# Altium footprint library IC.PcbLib: 204 footprints (part 10 of 13)
Each footprint in its own frame and in the unit in brackets; x right, y up, seen from the top. Pads: shape width x height; smd on the part's side, far side on the other; paste and mask are expansions set on the pad; w line width, h text height; cw(c..) or ccw(c..) is an arc to the next point about the centre after c.
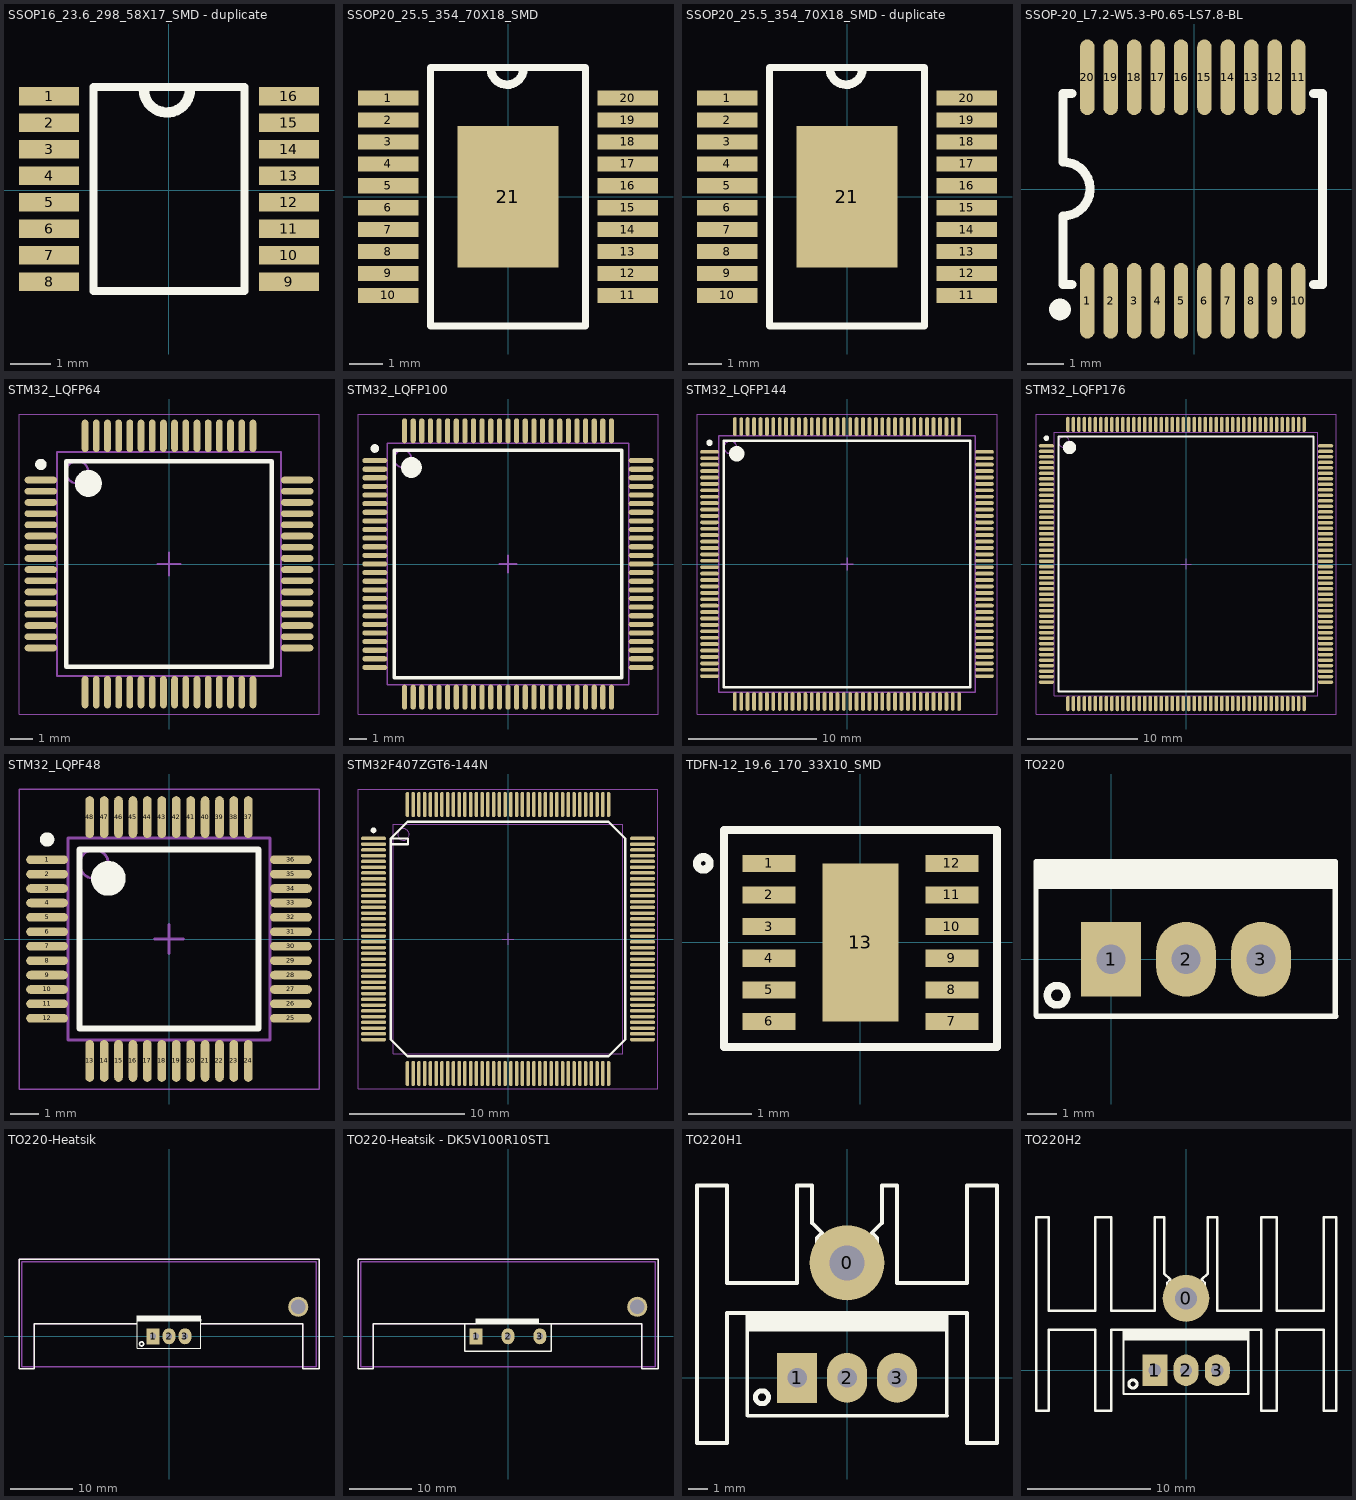
[diagram p9: the footprints below, top view; thin cyan lines are the x and y axes]

## SSOP16_23.6_298_58X17_SMD - duplicate [mm] "CASE: SSOP"
height 2.65
pads (16):
  rect 1.475x0.45 smd: 1(-2.938,2.3) 2(-2.938,1.65) 3(-2.938,1) 4(-2.938,0.35) 5(-2.938,-0.3) 6(-2.938,-0.95) 7(-2.938,-1.6) 8(-2.938,-2.25) 9(2.938,-2.25) 10(2.938,-1.6) 11(2.938,-0.95) 12(2.938,-0.3) 13(2.938,0.35) 14(2.938,1) 15(2.938,1.65) 16(2.938,2.3)
Top Overlay:
  lines w0.2: -1.85,-2.475 -1.85,2.525 1.85,2.525 1.85,-2.475 -1.85,-2.475
  lines w0.254: -0.615,2.464 ccw(c-0.051,2.464) 0.513,2.483
3D body "NPIC6C596APWJ.stp": height 1.1, standoff 0, extent -3.2,-2.474 3.2,2.526

## SSOP20_25.5_354_70X18_SMD [mm] "CASE: SSOP"
height 1.1
pads (21):
  rect 1.8x0.45 smd mask+0.076: 1(-3.55,2.925) 2(-3.55,2.275) 3(-3.55,1.625) 4(-3.55,0.975) 5(-3.55,0.325) 6(-3.55,-0.325) 7(-3.55,-0.975) 8(-3.55,-1.625) 9(-3.55,-2.275) 10(-3.55,-2.925) 11(3.55,-2.925) 12(3.55,-2.275) 13(3.55,-1.625) 14(3.55,-0.975) 15(3.55,-0.325) 16(3.55,0.325) 17(3.55,0.975) 18(3.55,1.625) 19(3.55,2.275) 20(3.55,2.925)
  rect 3x4.2 smd: 21(0,0)
Top Overlay:
  lines w0.2: -2.3,-3.835 -2.3,3.835 2.3,3.835 2.3,-3.835 -2.3,-3.835
  lines w0.254: -0.51,3.783 ccw(c-0.025,3.81) 0.458,3.768
3D body "MTCH108-I_SS.stp": height 2, standoff 0, extent -3.9,-3.6 3.9,3.6

## SSOP20_25.5_354_70X18_SMD - duplicate [mm] "CASE: SSOP"
height 1.1
pads (21):
  rect 1.8x0.45 smd mask+0.076: 1(-3.55,2.925) 2(-3.55,2.275) 3(-3.55,1.625) 4(-3.55,0.975) 5(-3.55,0.325) 6(-3.55,-0.325) 7(-3.55,-0.975) 8(-3.55,-1.625) 9(-3.55,-2.275) 10(-3.55,-2.925) 11(3.55,-2.925) 12(3.55,-2.275) 13(3.55,-1.625) 14(3.55,-0.975) 15(3.55,-0.325) 16(3.55,0.325) 17(3.55,0.975) 18(3.55,1.625) 19(3.55,2.275) 20(3.55,2.925)
  rect 3x4.2 smd: 21(0,0)
Top Overlay:
  lines w0.2: -2.3,-3.835 -2.3,3.835 2.3,3.835 2.3,-3.835 -2.3,-3.835
  lines w0.254: -0.51,3.783 ccw(c-0.025,3.81) 0.458,3.768
3D body "MTCH108-I_SS.stp": height 2, standoff 0, extent -3.9,-3.6 3.9,3.6

## SSOP-20_L7.2-W5.3-P0.65-LS7.8-BL [mm]
pads (20):
  oval 0.4x2.1 smd: 1(-2.973,-3.1) 2(-2.322,-3.1) 3(-1.672,-3.1) 4(-1.022,-3.1) 5(-0.372,-3.1) 6(0.279,-3.1) 7(0.929,-3.1) 8(1.579,-3.1) 9(2.229,-3.1) 10(2.879,-3.1) 11(2.879,3.1) 12(2.229,3.1) 13(1.579,3.1) 14(0.929,3.1) 15(0.279,3.1) 16(-0.372,3.1) 17(-1.022,3.1) 18(-1.672,3.1) 19(-2.322,3.1) 20(-2.973,3.1)
Top Overlay:
  lines w0.254: -3.647,-0.75 -3.647,-2.65 -3.404,-2.65 ; -3.646,-0.749 ccw(c-3.646,0) -3.647,0.75 -3.647,2.65 -3.404,2.65 ; 3.311,-2.65 3.553,-2.65 3.553,2.65 3.311,2.65
  lines w0.3: -3.841,-3.444 cw(c-3.73,-3.343) -3.831,-3.454
3D body "SSOP20L-150-0.64.STEP": height 1.63, standoff 0, extent -3.725,-2.997 3.725,2.997

## STM32_LQFP64 [mm] "TSQFP, 64-Leads, Body 10.00x10.00mm, Pitch 0.50mm, IPC Medium Density"
height 1.6
pads (64):
  oval 1.45x0.3 smd: 1(-5.725,3.75) 2(-5.725,3.25) 3(-5.725,2.75) 4(-5.725,2.25) 5(-5.725,1.75) 6(-5.725,1.25) 7(-5.725,0.75) 8(-5.725,0.25) 9(-5.725,-0.25) 10(-5.725,-0.75) 11(-5.725,-1.25) 12(-5.725,-1.75) 13(-5.725,-2.25) 14(-5.725,-2.75) 15(-5.725,-3.25) 16(-5.725,-3.75) 33(5.725,-3.75) 34(5.725,-3.25) 35(5.725,-2.75) 36(5.725,-2.25) 37(5.725,-1.75) 38(5.725,-1.25) 39(5.725,-0.75) 40(5.725,-0.25) 41(5.725,0.25) 42(5.725,0.75) 43(5.725,1.25) 44(5.725,1.75) 45(5.725,2.25) 46(5.725,2.75) 47(5.725,3.25) 48(5.725,3.75)
  oval 0.3x1.45 smd: 17(-3.75,-5.725) 18(-3.25,-5.725) 19(-2.75,-5.725) 20(-2.25,-5.725) 21(-1.75,-5.725) 22(-1.25,-5.725) 23(-0.75,-5.725) 24(-0.25,-5.725) 25(0.25,-5.725) 26(0.75,-5.725) 27(1.25,-5.725) 28(1.75,-5.725) 29(2.25,-5.725) 30(2.75,-5.725) 31(3.25,-5.725) 32(3.75,-5.725) 49(3.75,5.725) 50(3.25,5.725) 51(2.75,5.725) 52(2.25,5.725) 53(1.75,5.725) 54(1.25,5.725) 55(0.75,5.725) 56(0.25,5.725) 57(-0.25,5.725) 58(-0.75,5.725) 59(-1.25,5.725) 60(-1.75,5.725) 61(-2.25,5.725) 62(-2.75,5.725) 63(-3.25,5.725) 64(-3.75,5.725)
Top Overlay:
  circle w0.6: c-3.6,3.6 r0.3
  circle w0.25: c-5.725,4.45 r0.125
  lines w0.2: -4.6,-4.6 4.6,-4.6 4.6,4.6 -4.6,4.6 -4.6,-4.6
Mechanical 13:
  circle w0.1: c-4.1,4.1 r0.5
  lines w0.1: -5,-5 5,-5 5,5 -5,5 -5,-5
Mechanical 15:
  lines w0.05: -6.7,-6.7 6.7,-6.7 6.7,6.7 -6.7,6.7 -6.7,-6.7
  lines w0.1: -0.5,0 0.5,0 ; 0,-0.5 0,0.5
3D body "LQFP64.step": height 1.6, standoff 0, extent -6,-6 6,6

## STM32_LQFP100 [mm] "TSQFP, 100-Leads, Body 14.00x14.00mm, Pitch 0.50mm, IPC Medium Density"
height 1.6
pads (100):
  oval 1.45x0.3 smd: 1(-7.725,6) 2(-7.725,5.5) 3(-7.725,5) 4(-7.725,4.5) 5(-7.725,4) 6(-7.725,3.5) 7(-7.725,3) 8(-7.725,2.5) 9(-7.725,2) 10(-7.725,1.5) 11(-7.725,1) 12(-7.725,0.5) 13(-7.725,0) 14(-7.725,-0.5) 15(-7.725,-1) 16(-7.725,-1.5) 17(-7.725,-2) 18(-7.725,-2.5) 19(-7.725,-3) 20(-7.725,-3.5) 21(-7.725,-4) 22(-7.725,-4.5) 23(-7.725,-5) 24(-7.725,-5.5) 25(-7.725,-6) 51(7.725,-6) 52(7.725,-5.5) 53(7.725,-5) 54(7.725,-4.5) 55(7.725,-4) 56(7.725,-3.5) 57(7.725,-3) 58(7.725,-2.5) 59(7.725,-2) 60(7.725,-1.5) 61(7.725,-1) 62(7.725,-0.5) 63(7.725,0) 64(7.725,0.5) 65(7.725,1) 66(7.725,1.5) 67(7.725,2) 68(7.725,2.5) 69(7.725,3) 70(7.725,3.5) 71(7.725,4) 72(7.725,4.5) 73(7.725,5) 74(7.725,5.5) 75(7.725,6)
  oval 0.3x1.45 smd: 26(-6,-7.725) 27(-5.5,-7.725) 28(-5,-7.725) 29(-4.5,-7.725) 30(-4,-7.725) 31(-3.5,-7.725) 32(-3,-7.725) 33(-2.5,-7.725) 34(-2,-7.725) 35(-1.5,-7.725) 36(-1,-7.725) 37(-0.5,-7.725) 38(0,-7.725) 39(0.5,-7.725) 40(1,-7.725) 41(1.5,-7.725) 42(2,-7.725) 43(2.5,-7.725) 44(3,-7.725) 45(3.5,-7.725) 46(4,-7.725) 47(4.5,-7.725) 48(5,-7.725) 49(5.5,-7.725) 50(6,-7.725) 76(6,7.725) 77(5.5,7.725) 78(5,7.725) 79(4.5,7.725) 80(4,7.725) 81(3.5,7.725) 82(3,7.725) 83(2.5,7.725) 84(2,7.725) 85(1.5,7.725) 86(1,7.725) 87(0.5,7.725) 88(0,7.725) 89(-0.5,7.725) 90(-1,7.725) 91(-1.5,7.725) 92(-2,7.725) 93(-2.5,7.725) 94(-3,7.725) 95(-3.5,7.725) 96(-4,7.725) 97(-4.5,7.725) 98(-5,7.725) 99(-5.5,7.725) 100(-6,7.725)
Top Overlay:
  circle w0.6: c-5.6,5.6 r0.3
  circle w0.25: c-7.725,6.7 r0.125
  lines w0.2: -6.6,-6.6 6.6,-6.6 6.6,6.6 -6.6,6.6 -6.6,-6.6
Mechanical 13:
  circle w0.1: c-6.1,6.1 r0.5
  lines w0.1: -7,-7 7,-7 7,7 -7,7 -7,-7
Mechanical 15:
  lines w0.05: -8.7,-8.7 8.7,-8.7 8.7,8.7 -8.7,8.7 -8.7,-8.7
  lines w0.1: -0.5,0 0.5,0 ; 0,-0.5 0,0.5
3D body "LQFP100.step": height 1.6, standoff 0, extent -8,-8 8,8

## STM32_LQFP144 [mm] "TSQFP, 144-Leads, Body 20.00x20.00mm, Pitch 0.50mm, IPC Medium Density"
height 1.6
pads (144):
  oval 1.45x0.3 smd: 1(-10.725,8.75) 2(-10.725,8.25) 3(-10.725,7.75) 4(-10.725,7.25) 5(-10.725,6.75) 6(-10.725,6.25) 7(-10.725,5.75) 8(-10.725,5.25) 9(-10.725,4.75) 10(-10.725,4.25) 11(-10.725,3.75) 12(-10.725,3.25) 13(-10.725,2.75) 14(-10.725,2.25) 15(-10.725,1.75) 16(-10.725,1.25) 17(-10.725,0.75) 18(-10.725,0.25) 19(-10.725,-0.25) 20(-10.725,-0.75) 21(-10.725,-1.25) 22(-10.725,-1.75) 23(-10.725,-2.25) 24(-10.725,-2.75) 25(-10.725,-3.25) 26(-10.725,-3.75) 27(-10.725,-4.25) 28(-10.725,-4.75) 29(-10.725,-5.25) 30(-10.725,-5.75) 31(-10.725,-6.25) 32(-10.725,-6.75) 33(-10.725,-7.25) 34(-10.725,-7.75) 35(-10.725,-8.25) 36(-10.725,-8.75) 73(10.725,-8.75) 74(10.725,-8.25) 75(10.725,-7.75) 76(10.725,-7.25) 77(10.725,-6.75) 78(10.725,-6.25) 79(10.725,-5.75) 80(10.725,-5.25) 81(10.725,-4.75) 82(10.725,-4.25) 83(10.725,-3.75) 84(10.725,-3.25) 85(10.725,-2.75) 86(10.725,-2.25) 87(10.725,-1.75) 88(10.725,-1.25) 89(10.725,-0.75) 90(10.725,-0.25) 91(10.725,0.25) 92(10.725,0.75) 93(10.725,1.25) 94(10.725,1.75) 95(10.725,2.25) 96(10.725,2.75) 97(10.725,3.25) 98(10.725,3.75) 99(10.725,4.25) 100(10.725,4.75) 101(10.725,5.25) 102(10.725,5.75) 103(10.725,6.25) 104(10.725,6.75) 105(10.725,7.25) 106(10.725,7.75) 107(10.725,8.25) 108(10.725,8.75)
  oval 0.3x1.45 smd: 37(-8.75,-10.725) 38(-8.25,-10.725) 39(-7.75,-10.725) 40(-7.25,-10.725) 41(-6.75,-10.725) 42(-6.25,-10.725) 43(-5.75,-10.725) 44(-5.25,-10.725) 45(-4.75,-10.725) 46(-4.25,-10.725) 47(-3.75,-10.725) 48(-3.25,-10.725) 49(-2.75,-10.725) 50(-2.25,-10.725) 51(-1.75,-10.725) 52(-1.25,-10.725) 53(-0.75,-10.725) 54(-0.25,-10.725) 55(0.25,-10.725) 56(0.75,-10.725) 57(1.25,-10.725) 58(1.75,-10.725) 59(2.25,-10.725) 60(2.75,-10.725) 61(3.25,-10.725) 62(3.75,-10.725) 63(4.25,-10.725) 64(4.75,-10.725) 65(5.25,-10.725) 66(5.75,-10.725) 67(6.25,-10.725) 68(6.75,-10.725) 69(7.25,-10.725) 70(7.75,-10.725) 71(8.25,-10.725) 72(8.75,-10.725) 109(8.75,10.725) 110(8.25,10.725) 111(7.75,10.725) 112(7.25,10.725) 113(6.75,10.725) 114(6.25,10.725) 115(5.75,10.725) 116(5.25,10.725) 117(4.75,10.725) 118(4.25,10.725) 119(3.75,10.725) 120(3.25,10.725) 121(2.75,10.725) 122(2.25,10.725) 123(1.75,10.725) 124(1.25,10.725) 125(0.75,10.725) 126(0.25,10.725) 127(-0.25,10.725) 128(-0.75,10.725) 129(-1.25,10.725) 130(-1.75,10.725) 131(-2.25,10.725) 132(-2.75,10.725) 133(-3.25,10.725) 134(-3.75,10.725) 135(-4.25,10.725) 136(-4.75,10.725) 137(-5.25,10.725) 138(-5.75,10.725) 139(-6.25,10.725) 140(-6.75,10.725) 141(-7.25,10.725) 142(-7.75,10.725) 143(-8.25,10.725) 144(-8.75,10.725)
Top Overlay:
  circle w0.6: c-8.6,8.6 r0.3
  circle w0.25: c-10.725,9.45 r0.125
  lines w0.2: -9.6,-9.6 9.6,-9.6 9.6,9.6 -9.6,9.6 -9.6,-9.6
Mechanical 13:
  circle w0.1: c-9.1,9.1 r0.5
  lines w0.1: -10,-10 10,-10 10,10 -10,10 -10,-10
Mechanical 15:
  lines w0.05: -11.7,-11.7 11.7,-11.7 11.7,11.7 -11.7,11.7 -11.7,-11.7
  lines w0.1: -0.5,0 0.5,0 ; 0,-0.5 0,0.5
3D body "LQFP144.step": height 1.6, standoff 0, extent -11,-11 11,11

## STM32_LQFP176 [mm] "TSQFP, 176-Leads, Body 24.00x24.00mm, Pitch 0.50mm, IPC Medium Density"
height 1.6
pads (176):
  oval 1.4x0.3 smd: 1(-12.7,10.75) 2(-12.7,10.25) 3(-12.7,9.75) 4(-12.7,9.25) 5(-12.7,8.75) 6(-12.7,8.25) 7(-12.7,7.75) 8(-12.7,7.25) 9(-12.7,6.75) 10(-12.7,6.25) 11(-12.7,5.75) 12(-12.7,5.25) 13(-12.7,4.75) 14(-12.7,4.25) 15(-12.7,3.75) 16(-12.7,3.25) 17(-12.7,2.75) 18(-12.7,2.25) 19(-12.7,1.75) 20(-12.7,1.25) 21(-12.7,0.75) 22(-12.7,0.25) 23(-12.7,-0.25) 24(-12.7,-0.75) 25(-12.7,-1.25) 26(-12.7,-1.75) 27(-12.7,-2.25) 28(-12.7,-2.75) 29(-12.7,-3.25) 30(-12.7,-3.75) 31(-12.7,-4.25) 32(-12.7,-4.75) 33(-12.7,-5.25) 34(-12.7,-5.75) 35(-12.7,-6.25) 36(-12.7,-6.75) 37(-12.7,-7.25) 38(-12.7,-7.75) 39(-12.7,-8.25) 40(-12.7,-8.75) 41(-12.7,-9.25) 42(-12.7,-9.75) 43(-12.7,-10.25) 44(-12.7,-10.75) 89(12.7,-10.75) 90(12.7,-10.25) 91(12.7,-9.75) 92(12.7,-9.25) 93(12.7,-8.75) 94(12.7,-8.25) 95(12.7,-7.75) 96(12.7,-7.25) 97(12.7,-6.75) 98(12.7,-6.25) 99(12.7,-5.75) 100(12.7,-5.25) 101(12.7,-4.75) 102(12.7,-4.25) 103(12.7,-3.75) 104(12.7,-3.25) 105(12.7,-2.75) 106(12.7,-2.25) 107(12.7,-1.75) 108(12.7,-1.25) 109(12.7,-0.75) 110(12.7,-0.25) 111(12.7,0.25) 112(12.7,0.75) 113(12.7,1.25) 114(12.7,1.75) 115(12.7,2.25) 116(12.7,2.75) 117(12.7,3.25) 118(12.7,3.75) 119(12.7,4.25) 120(12.7,4.75) 121(12.7,5.25) 122(12.7,5.75) 123(12.7,6.25) 124(12.7,6.75) 125(12.7,7.25) 126(12.7,7.75) 127(12.7,8.25) 128(12.7,8.75) 129(12.7,9.25) 130(12.7,9.75) 131(12.7,10.25) 132(12.7,10.75)
  oval 0.3x1.4 smd: 45(-10.75,-12.7) 46(-10.25,-12.7) 47(-9.75,-12.7) 48(-9.25,-12.7) 49(-8.75,-12.7) 50(-8.25,-12.7) 51(-7.75,-12.7) 52(-7.25,-12.7) 53(-6.75,-12.7) 54(-6.25,-12.7) 55(-5.75,-12.7) 56(-5.25,-12.7) 57(-4.75,-12.7) 58(-4.25,-12.7) 59(-3.75,-12.7) 60(-3.25,-12.7) 61(-2.75,-12.7) 62(-2.25,-12.7) 63(-1.75,-12.7) 64(-1.25,-12.7) 65(-0.75,-12.7) 66(-0.25,-12.7) 67(0.25,-12.7) 68(0.75,-12.7) 69(1.25,-12.7) 70(1.75,-12.7) 71(2.25,-12.7) 72(2.75,-12.7) 73(3.25,-12.7) 74(3.75,-12.7) 75(4.25,-12.7) 76(4.75,-12.7) 77(5.25,-12.7) 78(5.75,-12.7) 79(6.25,-12.7) 80(6.75,-12.7) 81(7.25,-12.7) 82(7.75,-12.7) 83(8.25,-12.7) 84(8.75,-12.7) 85(9.25,-12.7) 86(9.75,-12.7) 87(10.25,-12.7) 88(10.75,-12.7) 133(10.75,12.7) 134(10.25,12.7) 135(9.75,12.7) 136(9.25,12.7) 137(8.75,12.7) 138(8.25,12.7) 139(7.75,12.7) 140(7.25,12.7) 141(6.75,12.7) 142(6.25,12.7) 143(5.75,12.7) 144(5.25,12.7) 145(4.75,12.7) 146(4.25,12.7) 147(3.75,12.7) 148(3.25,12.7) 149(2.75,12.7) 150(2.25,12.7) 151(1.75,12.7) 152(1.25,12.7) 153(0.75,12.7) 154(0.25,12.7) 155(-0.25,12.7) 156(-0.75,12.7) 157(-1.25,12.7) 158(-1.75,12.7) 159(-2.25,12.7) 160(-2.75,12.7) 161(-3.25,12.7) 162(-3.75,12.7) 163(-4.25,12.7) 164(-4.75,12.7) 165(-5.25,12.7) 166(-5.75,12.7) 167(-6.25,12.7) 168(-6.75,12.7) 169(-7.25,12.7) 170(-7.75,12.7) 171(-8.25,12.7) 172(-8.75,12.7) 173(-9.25,12.7) 174(-9.75,12.7) 175(-10.25,12.7) 176(-10.75,12.7)
Top Overlay:
  circle w0.25: c-12.7,11.45 r0.125
  circle w0.6: c-10.6,10.6 r0.3
  lines w0.2: -11.6,-11.6 -11.6,11.6 11.6,11.6 11.6,-11.6 -11.6,-11.6
Mechanical 13:
  circle w0.1: c-11.1,11.1 r0.5
  lines w0.1: -12,-12 -12,12 12,12 12,-12 -12,-12
Mechanical 15:
  lines w0.05: -13.65,-13.65 -13.65,13.65 13.65,13.65 13.65,-13.65 -13.65,-13.65
  lines w0.1: -0.5,0 0.5,0 ; 0,-0.5 0,0.5
3D body: height 1.6, standoff 0.15, extent -12,-12 12,12

## STM32_LQPF48 [mm]
height 1.6
pads (48):
  oval 1.45x0.3 smd: 1(-4.225,2.75) 2(-4.225,2.25) 3(-4.225,1.75) 4(-4.225,1.25) 5(-4.225,0.75) 6(-4.225,0.25) 7(-4.225,-0.25) 8(-4.225,-0.75) 9(-4.225,-1.25) 10(-4.225,-1.75) 11(-4.225,-2.25) 12(-4.225,-2.75) 25(4.225,-2.75) 26(4.225,-2.25) 27(4.225,-1.75) 28(4.225,-1.25) 29(4.225,-0.75) 30(4.225,-0.25) 31(4.225,0.25) 32(4.225,0.75) 33(4.225,1.25) 34(4.225,1.75) 35(4.225,2.25) 36(4.225,2.75)
  oval 0.3x1.45 smd: 13(-2.75,-4.225) 14(-2.25,-4.225) 15(-1.75,-4.225) 16(-1.25,-4.225) 17(-0.75,-4.225) 18(-0.25,-4.225) 19(0.25,-4.225) 20(0.75,-4.225) 21(1.25,-4.225) 22(1.75,-4.225) 23(2.25,-4.225) 24(2.75,-4.225) 37(2.75,4.225) 38(2.25,4.225) 39(1.75,4.225) 40(1.25,4.225) 41(0.75,4.225) 42(0.25,4.225) 43(-0.25,4.225) 44(-0.75,4.225) 45(-1.25,4.225) 46(-1.75,4.225) 47(-2.25,4.225) 48(-2.75,4.225)
Top Overlay:
  circle w0.6: c-2.1,2.1 r0.3
  circle w0.25: c-4.225,3.45 r0.125
  lines w0.2: -3.1,-3.1 3.1,-3.1 3.1,3.1 -3.1,3.1 -3.1,-3.1
Mechanical 13:
  circle w0.1: c-2.6,2.6 r0.5
  lines w0.1: -3.5,-3.5 3.5,-3.5 3.5,3.5 -3.5,3.5 -3.5,-3.5
Mechanical 15:
  lines w0.05: -5.2,-5.2 5.2,-5.2 5.2,5.2 -5.2,5.2 -5.2,-5.2
  lines w0.1: -0.5,0 0.5,0 ; 0,-0.5 0,0.5
3D body "STM32F103C8T62.step": height 1.6, standoff 0, extent -4.5,-4.5 4.5,4.5

## STM32F407ZGT6-144N [mm] "CQFP, 144-Leads, Body 24,70x24,70mm, Pitch 0,50mm, IPC Medium Density"
height 1.6
pads (144):
  oval 2.2x0.3 smd: 1(-11.7,8.75) 2(-11.7,8.25) 3(-11.7,7.75) 4(-11.7,7.25) 5(-11.7,6.75) 6(-11.7,6.25) 7(-11.7,5.75) 8(-11.7,5.25) 9(-11.7,4.75) 10(-11.7,4.25) 11(-11.7,3.75) 12(-11.7,3.25) 13(-11.7,2.75) 14(-11.7,2.25) 15(-11.7,1.75) 16(-11.7,1.25) 17(-11.7,0.75) 18(-11.7,0.25) 19(-11.7,-0.25) 20(-11.7,-0.75) 21(-11.7,-1.25) 22(-11.7,-1.75) 23(-11.7,-2.25) 24(-11.7,-2.75) 25(-11.7,-3.25) 26(-11.7,-3.75) 27(-11.7,-4.25) 28(-11.7,-4.75) 29(-11.7,-5.25) 30(-11.7,-5.75) 31(-11.7,-6.25) 32(-11.7,-6.75) 33(-11.7,-7.25) 34(-11.7,-7.75) 35(-11.7,-8.25) 36(-11.7,-8.75) 73(11.7,-8.75) 74(11.7,-8.25) 75(11.7,-7.75) 76(11.7,-7.25) 77(11.7,-6.75) 78(11.7,-6.25) 79(11.7,-5.75) 80(11.7,-5.25) 81(11.7,-4.75) 82(11.7,-4.25) 83(11.7,-3.75) 84(11.7,-3.25) 85(11.7,-2.75) 86(11.7,-2.25) 87(11.7,-1.75) 88(11.7,-1.25) 89(11.7,-0.75) 90(11.7,-0.25) 91(11.7,0.25) 92(11.7,0.75) 93(11.7,1.25) 94(11.7,1.75) 95(11.7,2.25) 96(11.7,2.75) 97(11.7,3.25) 98(11.7,3.75) 99(11.7,4.25) 100(11.7,4.75) 101(11.7,5.25) 102(11.7,5.75) 103(11.7,6.25) 104(11.7,6.75) 105(11.7,7.25) 106(11.7,7.75) 107(11.7,8.25) 108(11.7,8.75)
  oval 0.3x2.2 smd: 37(-8.75,-11.7) 38(-8.25,-11.7) 39(-7.75,-11.7) 40(-7.25,-11.7) 41(-6.75,-11.7) 42(-6.25,-11.7) 43(-5.75,-11.7) 44(-5.25,-11.7) 45(-4.75,-11.7) 46(-4.25,-11.7) 47(-3.75,-11.7) 48(-3.25,-11.7) 49(-2.75,-11.7) 50(-2.25,-11.7) 51(-1.75,-11.7) 52(-1.25,-11.7) 53(-0.75,-11.7) 54(-0.25,-11.7) 55(0.25,-11.7) 56(0.75,-11.7) 57(1.25,-11.7) 58(1.75,-11.7) 59(2.25,-11.7) 60(2.75,-11.7) 61(3.25,-11.7) 62(3.75,-11.7) 63(4.25,-11.7) 64(4.75,-11.7) 65(5.25,-11.7) 66(5.75,-11.7) 67(6.25,-11.7) 68(6.75,-11.7) 69(7.25,-11.7) 70(7.75,-11.7) 71(8.25,-11.7) 72(8.75,-11.7) 109(8.75,11.7) 110(8.25,11.7) 111(7.75,11.7) 112(7.25,11.7) 113(6.75,11.7) 114(6.25,11.7) 115(5.75,11.7) 116(5.25,11.7) 117(4.75,11.7) 118(4.25,11.7) 119(3.75,11.7) 120(3.25,11.7) 121(2.75,11.7) 122(2.25,11.7) 123(1.75,11.7) 124(1.25,11.7) 125(0.75,11.7) 126(0.25,11.7) 127(-0.25,11.7) 128(-0.75,11.7) 129(-1.25,11.7) 130(-1.75,11.7) 131(-2.25,11.7) 132(-2.75,11.7) 133(-3.25,11.7) 134(-3.75,11.7) 135(-4.25,11.7) 136(-4.75,11.7) 137(-5.25,11.7) 138(-5.75,11.7) 139(-6.25,11.7) 140(-6.75,11.7) 141(-7.25,11.7) 142(-7.75,11.7) 143(-8.25,11.7) 144(-8.75,11.7)
Top Overlay:
  circle w0.25: c-11.7,9.45 r0.125
  lines w0.2: -10.2,8.25 -8.7,8.25 -8.7,8.75 -10.2,8.75 ; -10.2,8.75 -8.75,10.2 8.75,10.2 10.2,8.75 10.2,-8.75 8.75,-10.2 -8.75,-10.2 -10.2,-8.75 -10.2,8.75
Mechanical 13:
  circle w0.1: c-9.1,9.1 r0.5
  lines w0.1: -10,-10 10,-10 10,10 -10,10 -10,-10
Mechanical 15:
  lines w0.05: -13.05,-13.05 13.05,-13.05 13.05,13.05 -13.05,13.05 -13.05,-13.05
  lines w0.1: -0.5,0 0.5,0 ; 0,-0.5 0,0.5
3D body "STM32F407ZGT6-144N.step": height 1.45, standoff 0, extent -12.45,-12.45 12.45,12.45

## TDFN-12_19.6_170_33X10_SMD [mm] "TDFN-12 Package"
height 0.5
pads (13):
  rect 0.84x0.27 smd mask+0.076: 1(-1.445,1.25) 2(-1.445,0.75) 3(-1.445,0.25) 4(-1.445,-0.25) 5(-1.445,-0.75) 6(-1.445,-1.25) 7(1.445,-1.25) 8(1.445,-0.75) 9(1.445,-0.25) 10(1.445,0.25) 11(1.445,0.75) 12(1.445,1.25)
  rect 1.2x2.5 smd mask+0.076: 13(0,0)
Top Overlay:
  circle w0.127: c-2.485,1.25 r0.1
  lines w0.127: -2.159,-1.651 2.159,-1.651 2.159,1.778 -2.159,1.778 -2.159,-1.27 -2.159,-1.651
Top Paste:
  region: -0.54,0.79 0.54,0.79 0.54,-0.79 -0.54,-0.79
3D body "User Library-TDFN-12-EP-3x3-05.STEP": height 0.75, standoff 0, extent -1.5,-1.5 1.5,1.5

## TO220 [mil] "TO-220"
height 200
pads (3):
  rect 80x100 hole 39: 1(0,0)
  oval 80x100 hole 39: 2(100,0) 3(200,0)
Top Overlay:
  circle w10: c-72.03,-48 r12.97
  rectangle: -99,94 300,130
  lines w7: 298,107 299,93 ; -100,-75 -99,-76 -76,-76 300,-76 299,-75 299,130 -100,130 -100,-75
3D body "User Library-TO-220-1.STEP": height 322.83, standoff -810.24, extent -94.88,-80 294.88,97.17

## TO220-Heatsik [mil] "TO-220"
height 200
pads (4):
  rect 80x100 hole 39: 1(-100,0)
  oval 80x100 hole 39: 2(0,0) 3(100,0)
  round 125.98 hole 90.55: ""(811.02,185.04)
Top Overlay:
  circle w10: c-172.03,-48 r12.97
  rectangle: -199,94 200,130
  lines w7: 198,107 199,93 ; -200,-75 -200,130 199,130 199,-75 200,-76 -176,-76 -199,-76 -200,-75
  lines w7.87: -200.79,78.74 -846.46,78.74 -846.46,43.31 -846.46,-204.72 -940.94,-204.72 -940.94,484.25 940.94,484.25 940.94,-204.72 838.58,-204.72 838.58,78.74 200.79,78.74
Top Assembly:
  lines w7.87: -925.2,-190.24 925.19,-190.24 925.19,467.24 -925.2,467.24 -925.2,-190.24
Mechanical 15:
  lines w7.87: -940.94,-204.72 -940.94,484.25 940.94,484.25 940.94,-204.72 ; -846.46,-204.72 -846.46,43.31 -846.46,78.74 -200.79,78.74 ; 200.79,78.74 838.58,78.74 838.58,-204.72
  text "+" at -20.32,-30.31 h60
3D body "User Library-TO-220-1.STEP": height 322.83, standoff -810.24, extent -194.88,-80 194.88,97.17
3D body "Part2.STEP": height 1653.54, standoff -39.37, extent -925.2,-190.24 925.19,467.24

## TO220-Heatsik - DK5V100R10ST1 [mil] "TO-220"
height 200
pads (4):
  rect 80x100 hole 39: 1(-200,0)
  oval 80x100 hole 39: 2(0,0) 3(200,0)
  round 125.98 hole 90.55: ""(811.02,185.04)
Top Overlay:
  rectangle: -204.91,74.8 194.09,110.8
  lines w7.87: -270.47,78.35 -270.47,-95.28 259.45,-95.28 271.65,-95.28 271.65,79.13 ; -196.85,78.74 -429.13,78.74 -846.46,78.74 -846.46,43.31 -846.46,-204.72 -940.94,-204.72 -940.94,484.25 940.94,484.25 940.94,-204.72 838.58,-204.72 838.58,78.74 175.59,78.74
Top Assembly:
  lines w7.87: -925.2,-190.24 925.19,-190.24 925.19,467.24 -925.2,467.24 -925.2,-190.24
Mechanical 15:
  lines w7.87: -940.94,-204.72 -940.94,484.25 940.94,484.25 940.94,-204.72 ; -846.46,-204.72 -846.46,43.31 -846.46,78.74 -200.79,78.74 ; 200.79,78.74 838.58,78.74 838.58,-204.72
  text "+" at -20.32,-30.31 h60
3D body "Part2.STEP": height 1653.54, standoff -39.37, extent -925.2,-188.98 925.2,468.5
3D body "User Library-TO-220-1.STEP": height 322.83, standoff -810.24, extent -194.88,-80 194.88,97.17

## TO220H1 [mil] "TO-220 - 1-2-3"
height 200
pads (4):
  round 150 hole 70: 0(0,230)
  rect 80x100 hole 39: 1(-100,0)
  oval 80x100 hole 39: 2(0,0) 3(100,0)
Top Overlay:
  circle w10: c-170.03,-39 r12.97
  rectangle: -201,93 198,129
  lines w7: -200,100 198.5,100 199,93 ; -200,-75 -200,130 199,130 199,-75 200,-76 -176,-76 -199,-76 -200,-75
  lines w8: -300,-130 -240,-130 -240,130 240,130 240,-130 300,-130 300,385 240,385 240,190 100,190 100,385 70,385 70,310 50,290 60,280 60,210 40,190 -40,190 -60,210 -60,280 -50,290 -70,310 -70,385 -100,385 -100,190 -240,190 -240,385 -300,385 -300,-130
3D body "User Library-TO-220-1.STEP": height 850.24, standoff -282.83, extent -194.88,-82 194.88,95.17
3D body "User Library-Disipador 34M8491-1.STEP": height 1000, standoff -122.05, extent -246,73.03 250.06,328.97

## TO220H2 [mil] "TO-220 - 1-2-3"
height 200
pads (4):
  round 150 hole 70: 0(0,230)
  rect 80x100 hole 39: 1(-100,0)
  oval 80x100 hole 39: 2(0,0) 3(100,0)
Top Overlay:
  circle w10: c-169.97,-44 r12.97
  rectangle: -201,95 198,131
  lines w7: -200,100 198.5,100 199,93 ; -200,-75 -199,-76 -176,-76 200,-76 199,-75 199,130 -200,130 -200,-75
  lines w8: -480,-130 -480,490 -440,490 -440,190 -290,190 -290,490 -240,490 -240,190 -100,190 -100,490 -70,490 -70,310 -50,290 -60,280 -60,210 -40,190 40,190 60,210 60,280 50,290 70,310 70,490 100,490 100,190 240,190 240,490 290,490 290,190 440,190 440,490 480,490 480,-130 440,-130 440,130 290,130 290,-130 240,-130 240,130 -240,130 -240,-130 -290,-130 -290,130 -440,130 -440,-130 -480,-130
3D body "User Library-TO-220-1.STEP": height 810.24, standoff -322.83, extent -194.76,-82.17 195,95
3D body "User Library-heat sink-1.STEP": height 1205.51, standoff 0, extent -448.79,-177 452.79,468.67